# Altium footprint library Footprint.PcbLib: 411 footprints (part 12 of 26)
Each footprint in its own frame and in the unit in brackets; x right, y up, seen from the top. Pads: shape width x height; smd on the part's side, far side on the other; paste and mask are expansions set on the pad; w line width, h text height; cw(c..) or ccw(c..) is an arc to the next point about the centre after c.
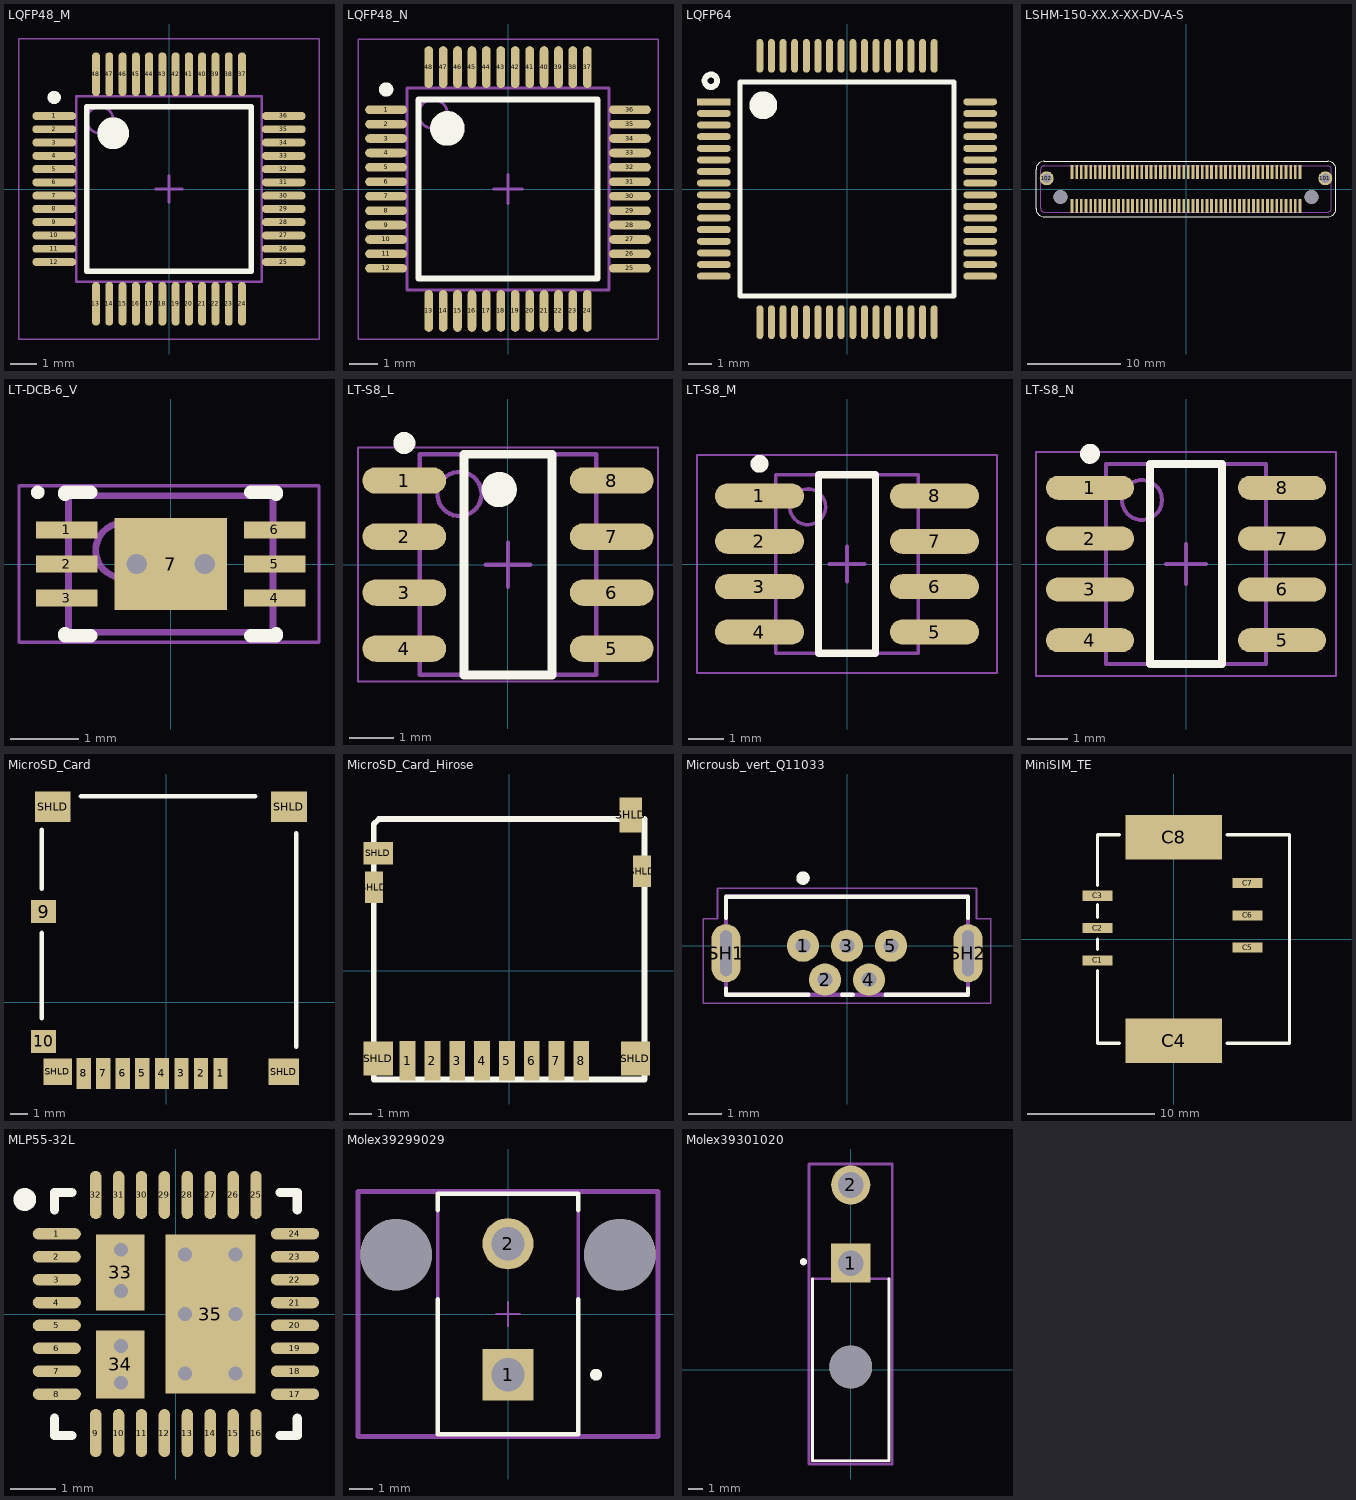
[diagram p11: the footprints below, top view; thin cyan lines are the x and y axes]

## LQFP48_M [mm] "QFP, 48-Leads, Body 7x7mm, Pitch 0.5mm, IPC Low Density"
height 1.6
pads (48):
  oval 1.65x0.3 smd: 1(-4.325,2.75) 2(-4.325,2.25) 3(-4.325,1.75) 4(-4.325,1.25) 5(-4.325,0.75) 6(-4.325,0.25) 7(-4.325,-0.25) 8(-4.325,-0.75) 9(-4.325,-1.25) 10(-4.325,-1.75) 11(-4.325,-2.25) 12(-4.325,-2.75) 25(4.325,-2.75) 26(4.325,-2.25) 27(4.325,-1.75) 28(4.325,-1.25) 29(4.325,-0.75) 30(4.325,-0.25) 31(4.325,0.25) 32(4.325,0.75) 33(4.325,1.25) 34(4.325,1.75) 35(4.325,2.25) 36(4.325,2.75)
  oval 0.3x1.65 smd: 13(-2.75,-4.325) 14(-2.25,-4.325) 15(-1.75,-4.325) 16(-1.25,-4.325) 17(-0.75,-4.325) 18(-0.25,-4.325) 19(0.25,-4.325) 20(0.75,-4.325) 21(1.25,-4.325) 22(1.75,-4.325) 23(2.25,-4.325) 24(2.75,-4.325) 37(2.75,4.325) 38(2.25,4.325) 39(1.75,4.325) 40(1.25,4.325) 41(0.75,4.325) 42(0.25,4.325) 43(-0.25,4.325) 44(-0.75,4.325) 45(-1.25,4.325) 46(-1.75,4.325) 47(-2.25,4.325) 48(-2.75,4.325)
Top Overlay:
  circle w0.6: c-2.1,2.1 r0.3
  circle w0.25: c-4.325,3.45 r0.125
  lines w0.2: -3.1,-3.1 3.1,-3.1 3.1,3.1 -3.1,3.1 -3.1,-3.1
Mechanical 13:
  circle w0.1: c-2.6,2.6 r0.5
  lines w0.1: -3.5,-3.5 3.5,-3.5 3.5,3.5 -3.5,3.5 -3.5,-3.5
Mechanical 15:
  lines w0.05: -5.65,-5.65 5.65,-5.65 5.65,5.65 -5.65,5.65 -5.65,-5.65
  lines w0.1: -0.5,0 0.5,0 ; 0,-0.5 0,0.5
3D body: height 1.6, standoff 0.05, extent -3.5,-3.5 3.5,3.5

## LQFP48_N [mm] "QFP, 48-Leads, Body 7x7mm, Pitch 0.5mm, IPC Medium Density"
height 1.6
pads (48):
  oval 1.45x0.3 smd: 1(-4.225,2.75) 2(-4.225,2.25) 3(-4.225,1.75) 4(-4.225,1.25) 5(-4.225,0.75) 6(-4.225,0.25) 7(-4.225,-0.25) 8(-4.225,-0.75) 9(-4.225,-1.25) 10(-4.225,-1.75) 11(-4.225,-2.25) 12(-4.225,-2.75) 25(4.225,-2.75) 26(4.225,-2.25) 27(4.225,-1.75) 28(4.225,-1.25) 29(4.225,-0.75) 30(4.225,-0.25) 31(4.225,0.25) 32(4.225,0.75) 33(4.225,1.25) 34(4.225,1.75) 35(4.225,2.25) 36(4.225,2.75)
  oval 0.3x1.45 smd: 13(-2.75,-4.225) 14(-2.25,-4.225) 15(-1.75,-4.225) 16(-1.25,-4.225) 17(-0.75,-4.225) 18(-0.25,-4.225) 19(0.25,-4.225) 20(0.75,-4.225) 21(1.25,-4.225) 22(1.75,-4.225) 23(2.25,-4.225) 24(2.75,-4.225) 37(2.75,4.225) 38(2.25,4.225) 39(1.75,4.225) 40(1.25,4.225) 41(0.75,4.225) 42(0.25,4.225) 43(-0.25,4.225) 44(-0.75,4.225) 45(-1.25,4.225) 46(-1.75,4.225) 47(-2.25,4.225) 48(-2.75,4.225)
Top Overlay:
  circle w0.25: c-4.225,3.45 r0.125
  circle w0.6: c-2.1,2.1 r0.3
  lines w0.2: -3.1,-3.1 -3.1,3.1 3.1,3.1 3.1,-3.1 -3.1,-3.1
Mechanical 13:
  circle w0.1: c-2.6,2.6 r0.5
  lines w0.1: -3.5,-3.5 -3.5,3.5 3.5,3.5 3.5,-3.5 -3.5,-3.5
Mechanical 15:
  lines w0.05: -5.2,-5.2 -5.2,5.2 5.2,5.2 5.2,-5.2 -5.2,-5.2
  lines w0.1: -0.5,0 0.5,0 ; 0,-0.5 0,0.5
3D body: height 1.6, standoff 0.05, extent -3.5,-3.5 3.5,3.5

## LQFP64 [mm]
height 1.6
pads (64):
  rect 1.45x0.3 smd: 1(-5.725,3.75)
  oval 1.45x0.3 smd: 2(-5.725,3.25) 3(-5.725,2.75) 4(-5.725,2.25) 5(-5.725,1.75) 6(-5.725,1.25) 7(-5.725,0.75) 8(-5.725,0.25) 9(-5.725,-0.25) 10(-5.725,-0.75) 11(-5.725,-1.25) 12(-5.725,-1.75) 13(-5.725,-2.25) 14(-5.725,-2.75) 15(-5.725,-3.25) 16(-5.725,-3.75) 33(5.725,-3.75) 34(5.725,-3.25) 35(5.725,-2.75) 36(5.725,-2.25) 37(5.725,-1.75) 38(5.725,-1.25) 39(5.725,-0.75) 40(5.725,-0.25) 41(5.725,0.25) 42(5.725,0.75) 43(5.725,1.25) 44(5.725,1.75) 45(5.725,2.25) 46(5.725,2.75) 47(5.725,3.25) 48(5.725,3.75)
  oval 0.3x1.45 smd: 17(-3.75,-5.725) 18(-3.25,-5.725) 19(-2.75,-5.725) 20(-2.25,-5.725) 21(-1.75,-5.725) 22(-1.25,-5.725) 23(-0.75,-5.725) 24(-0.25,-5.725) 25(0.25,-5.725) 26(0.75,-5.725) 27(1.25,-5.725) 28(1.75,-5.725) 29(2.25,-5.725) 30(2.75,-5.725) 31(3.25,-5.725) 32(3.75,-5.725) 49(3.75,5.725) 50(3.25,5.725) 51(2.75,5.725) 52(2.25,5.725) 53(1.75,5.725) 54(1.25,5.725) 55(0.75,5.725) 56(0.25,5.725) 57(-0.25,5.725) 58(-0.75,5.725) 59(-1.25,5.725) 60(-1.75,5.725) 61(-2.25,5.725) 62(-2.75,5.725) 63(-3.25,5.725) 64(-3.75,5.725)
Top Overlay:
  circle w0.25: c-5.854,4.654 r0.269
  circle w0.6: c-3.6,3.6 r0.3
  lines w0.2: -4.6,-4.6 -4.6,4.6 4.6,4.6 4.6,-4.6 -4.6,-4.6
3D body "User Library-LQFP-64-1.step": height 1.5, standoff 0, extent -6,-6 6,6

## LSHM-150-XX.X-XX-DV-A-S [mm]
pads (104):
  rect 0.3x1.5 smd: 1(12.25,-1.85) 2(12.25,1.85) 3(11.75,-1.85) 4(11.75,1.85) 5(11.25,-1.85) 6(11.25,1.85) 7(10.75,-1.85) 8(10.75,1.85) 9(10.25,-1.85) 10(10.25,1.85) 11(9.75,-1.85) 12(9.75,1.85) 13(9.25,-1.85) 14(9.25,1.85) 15(8.75,-1.85) 16(8.75,1.85) 17(8.25,-1.85) 18(8.25,1.85) 19(7.75,-1.85) 20(7.75,1.85) 21(7.25,-1.85) 22(7.25,1.85) 23(6.75,-1.85) 24(6.75,1.85) 25(6.25,-1.85) 26(6.25,1.85) 27(5.75,-1.85) 28(5.75,1.85) 29(5.25,-1.85) 30(5.25,1.85) 31(4.75,-1.85) 32(4.75,1.85) 33(4.25,-1.85) 34(4.25,1.85) 35(3.75,-1.85) 36(3.75,1.85) 37(3.25,-1.85) 38(3.25,1.85) 39(2.75,-1.85) 40(2.75,1.85) 41(2.25,-1.85) 42(2.25,1.85) 43(1.75,-1.85) 44(1.75,1.85) 45(1.25,-1.85) 46(1.25,1.85) 47(0.75,-1.85) 48(0.75,1.85) 49(0.25,-1.85) 50(0.25,1.85) 51(-0.25,-1.85) 52(-0.25,1.85) 53(-0.75,-1.85) 54(-0.75,1.85) 55(-1.25,-1.85) 56(-1.25,1.85) 57(-1.75,-1.85) 58(-1.75,1.85) 59(-2.25,-1.85) 60(-2.25,1.85) 61(-2.75,-1.85) 62(-2.75,1.85) 63(-3.25,-1.85) 64(-3.25,1.85) 65(-3.75,-1.85) 66(-3.75,1.85) 67(-4.25,-1.85) 68(-4.25,1.85) 69(-4.75,-1.85) 70(-4.75,1.85) 71(-5.25,-1.85) 72(-5.25,1.85) 73(-5.75,-1.85) 74(-5.75,1.85) 75(-6.25,-1.85) 76(-6.25,1.85) 77(-6.75,-1.85) 78(-6.75,1.85) 79(-7.25,-1.85) 80(-7.25,1.85) 81(-7.75,-1.85) 82(-7.75,1.85) 83(-8.25,-1.85) 84(-8.25,1.85) 85(-8.75,-1.85) 86(-8.75,1.85) 87(-9.25,-1.85) 88(-9.25,1.85) 89(-9.75,-1.85) 90(-9.75,1.85) 91(-10.25,-1.85) 92(-10.25,1.85) 93(-10.75,-1.85) 94(-10.75,1.85) 95(-11.25,-1.85) 96(-11.25,1.85) 97(-11.75,-1.85) 98(-11.75,1.85) 99(-12.25,-1.85) 100(-12.25,1.85)
  round 1.5 hole 1: 101(14.975,1.15) 102(-14.975,1.15)
  round 1.5 hole 1.5 unplated: ""(-13.5,-0.85) ""(13.5,-0.85)
Top Overlay:
  lines w0.127: -16.125,-2.1 ccw(c-15.225,-2.1) -15.225,-3 15.225,-3 ccw(c15.225,-2.1) 16.125,-2.1 16.125,2.1 ccw(c15.225,2.1) 15.225,3 -15.225,3 ccw(c-15.225,2.1) -16.125,2.1 -16.125,-2.1
Mechanical 13:
  lines w0.127: -15.625,-2.09 ccw(c-15.225,-2.09) -15.225,-2.49 15.225,-2.49 ccw(c15.225,-2.09) 15.625,-2.09 15.625,2.09 ccw(c15.225,2.09) 15.225,2.49 -15.225,2.49 ccw(c-15.225,2.09) -15.625,2.09 -15.625,-2.09
3D body "JM2.step": height 5.44, standoff -1.66, extent -15.423,-2.5 15.423,2.48

## LT-DCB-6_V [mm] "SON, 6-Leads, Body 3x2mm, Pitch 0.5mm, Thermal Pad 1.65x1.35mm"
height 0.8
pads (7):
  rect 0.9x0.25 smd mask+0.102: 1(-1.525,0.5) 2(-1.525,0) 3(-1.525,-0.5) 4(1.525,-0.5) 5(1.525,0) 6(1.525,0.5)
  rect 1.65x1.35 smd mask+0.102: 7(0,0)
via 0.5,0 diameter 0.6 hole 0.3
via -0.5,0 diameter 0.6 hole 0.3
Top Overlay:
  circle w0.1: c-1.95,1.05 r0.05
  lines w0.2: -1.55,-1.025 -1.55,-1.05 -1.175,-1.05 ; -1.55,1.025 -1.55,1.05 -1.175,1.05 ; 1.175,-1.05 1.55,-1.05 1.55,-1.025 ; 1.175,1.05 1.55,1.05 1.55,1.025
Mechanical 13:
  circle w0.1: c-0.7,0.2 r0.4
  lines w0.1: -1.5,-1 1.5,-1 1.5,1 -1.5,1 -1.5,-1
Mechanical 15:
  lines w0.05: -2.225,-1.15 2.175,-1.15 2.175,1.15 -2.225,1.15 -2.225,-1.15
  lines w0.1: -0.5,0 0.5,0 ; 0,-0.5 0,0.5
3D body: height 0.8, standoff 0, extent -1.5,-1 1.5,1

## LT-S8_L [mm] "SOP, 8-Leads, Body 4.9x3.9mm, Pitch 1.27mm, IPC High Density"
height 1.76
pads (8):
  oval 1.9x0.6 smd: 1(-2.35,1.905) 2(-2.35,0.635) 3(-2.35,-0.635) 4(-2.35,-1.905) 5(2.35,-1.905) 6(2.35,-0.635) 7(2.35,0.635) 8(2.35,1.905)
Top Overlay:
  circle w0.4: c-0.2,1.7 r0.2
  circle w0.25: c-2.35,2.755 r0.125
  lines w0.2: -1,-2.5 1,-2.5 1,2.5 -1,2.5 -1,-2.5
Mechanical 13:
  circle w0.1: c-1.1,1.6 r0.5
  lines w0.1: -2,-2.5 2,-2.5 2,2.5 -2,2.5 -2,-2.5
Mechanical 15:
  lines w0.05: -3.4,-2.65 3.4,-2.65 3.4,2.65 -3.4,2.65 -3.4,-2.65
  lines w0.1: -0.5,0 0.5,0 ; 0,-0.5 0,0.5
3D body: height 1.76, standoff 0.1, extent -2,-2.5 2,2.5

## LT-S8_M [mm] "SOP, 8-Leads, Body 4.9x3.9mm, Pitch 1.27mm, IPC Low Density"
height 1.76
pads (8):
  oval 2.5x0.7 smd: 1(-2.45,1.905) 2(-2.45,0.635) 3(-2.45,-0.635) 4(-2.45,-1.905) 5(2.45,-1.905) 6(2.45,-0.635) 7(2.45,0.635) 8(2.45,1.905)
Top Overlay:
  circle w0.25: c-2.45,2.805 r0.125
  lines w0.2: -0.8,-2.5 0.8,-2.5 0.8,2.5 -0.8,2.5 -0.8,-2.5
Mechanical 13:
  circle w0.1: c-1.1,1.6 r0.5
  lines w0.1: -2,-2.5 2,-2.5 2,2.5 -2,2.5 -2,-2.5
Mechanical 15:
  lines w0.05: -4.2,-3.05 4.2,-3.05 4.2,3.05 -4.2,3.05 -4.2,-3.05
  lines w0.1: -0.5,0 0.5,0 ; 0,-0.5 0,0.5
3D body: height 1.76, standoff 0.1, extent -2,-2.5 2,2.5

## LT-S8_N [mm] "SOP, 8-Leads, Body 4.9x3.9mm, Pitch 1.27mm, IPC Medium Density"
height 1.76
pads (8):
  oval 2.2x0.6 smd: 1(-2.4,1.905) 2(-2.4,0.635) 3(-2.4,-0.635) 4(-2.4,-1.905) 5(2.4,-1.905) 6(2.4,-0.635) 7(2.4,0.635) 8(2.4,1.905)
Top Overlay:
  circle w0.25: c-2.4,2.755 r0.125
  lines w0.2: -0.9,-2.5 0.9,-2.5 0.9,2.5 -0.9,2.5 -0.9,-2.5
Mechanical 13:
  circle w0.1: c-1.1,1.6 r0.5
  lines w0.1: -2,-2.5 2,-2.5 2,2.5 -2,2.5 -2,-2.5
Mechanical 15:
  lines w0.05: -3.75,-2.8 3.75,-2.8 3.75,2.8 -3.75,2.8 -3.75,-2.8
  lines w0.1: -0.5,0 0.5,0 ; 0,-0.5 0,0.5
3D body: height 1.76, standoff 0.1, extent -2,-2.5 2,2.5

## M3_Mounting_Hole [mm]
via 0,0 diameter 7 hole 3.2

## MicroSD_Card [mm]
pads (14):
  rect 0.8x1.75 smd: 1(3.05,-4) 2(1.95,-4) 3(0.85,-4) 4(-0.25,-4) 5(-1.35,-4) 6(-2.45,-4) 7(-3.55,-4) 8(-4.65,-4)
  rect 1.4x1.29 smd: 9(-6.9,5.1) 10(-6.9,-2.2)
  rect 2x1.7 smd: SHLD(-6.4,11) SHLD(6.9,11)
  rect 1.6x1.5 smd: SHLD(-6.1,-3.9)
  rect 1.7x1.5 smd: SHLD(6.6,-3.9)
Top Overlay:
  lines w0.254: -7,-0.9 -7,3.9 ; -7,6.4 -7,9.7 ; -4.8,11.6 5,11.6 ; 7.3,-2.5 7.3,9.5
3D body "5027740891.stp": height 1.78, standoff -0.02, extent -7.005,-4.415 7.295,11.585

## MicroSD_Card_Hirose [mm]
pads (14):
  rect 0.7x1.75 smd: 1(-4.5,-4) 2(-3.4,-4) 3(-2.3,-4) 4(-1.2,-4) 5(-0.1,-4) 6(1,-4) 7(2.1,-4) 8(3.2,-4)
  rect 0.8x1.4 smd: SHLD(-6,3.7) SHLD(5.9,4.4)
  rect 1.3x1.5 smd: SHLD(-5.8,-3.9) SHLD(5.6,-3.9)
  rect 1.3x1 smd: SHLD(-5.8,5.2)
  rect 1x1.55 smd: SHLD(5.4,6.9)
Top Overlay:
  lines w0.254: 5.9,6.725 -5.775,6.725 -6,6.5 -6,-4.826 6,-4.826 6,6.725

## Microusb_vert_Q11033 [mm]
pads (7):
  round 0.948 hole 0.44: 1(-1.3,0) 2(-0.65,-1) 3(0,0) 4(0.65,-1) 5(1.3,0)
  oval 0.858x1.716 hole 0.35 slot 1.35 at 90 deg: SH1(-3.575,-0.22) SH2(3.575,-0.22)
Top Overlay:
  circle w0.2: c-1.3,2 r0.1
  lines w0.127: -3.575,-1.26 -3.575,-1.45 -1.14,-1.45 ; -3.575,0.82 -3.575,1.45 3.575,1.45 3.575,0.82 ; -0.15,-1.45 0.17,-1.45 ; 1.14,-1.45 3.575,-1.45 3.575,-1.26
Mechanical 13:
  circle w0.2: c-1.3,0 r0.1
  lines w0.127: -3.575,-1.45 -3.575,1.45 3.575,1.45 3.575,-1.45 -3.575,-1.45
Mechanical 15:
  lines w0.05: -4.25,-1.7 4.25,-1.7 4.25,0.8 3.825,0.8 3.825,1.7 -3.825,1.7 -3.825,0.8 -4.25,0.8 -4.25,-1.7
3D body "614105150721.stp": height 5.66, standoff -1.49, extent -3.937,-1.577 4.063,1.323

## MiniSIM_TE [mm]
pads (8):
  rect 2.38x0.8 smd: C1(-6,-1.68) C2(-6,0.86) C3(-6,3.4) C5(5.8,-0.68) C6(5.8,1.86) C7(5.8,4.4)
  rect 7.6x3.5 smd: С4(0,-8) С8(0,8)
Top Overlay:
  lines w0.254: -6,-2.5 -6,-8.2 -4.3,-8.2 ; -6,-0.8 -6,0 ; -6,1.7 -6,2.7 ; -6,4.2 -6,8.2 -4.3,8.2 ; 4.2,-8.2 9.1,-8.2 9.1,8.2 4.2,8.2
3D body "c-1932768-1-a-3d.stp": height 2.02, standoff 0.01, extent -5.95,-8.15 9.1,8.15

## MLP55-32L [mm] "QFN, 32-Leads, Body 5,00x5,00mm, Pitch 0,50mm, Thermal Pad 3,48x3,48mm, IPC Medium Density"
height 0.85
pads (35):
  oval 1.05x0.25 smd: 1(-2.6,1.75) 2(-2.6,1.25) 3(-2.6,0.75) 4(-2.6,0.25) 5(-2.6,-0.25) 6(-2.6,-0.75) 7(-2.6,-1.25) 8(-2.6,-1.75) 17(2.6,-1.75) 18(2.6,-1.25) 19(2.6,-0.75) 20(2.6,-0.25) 21(2.6,0.25) 22(2.6,0.75) 23(2.6,1.25) 24(2.6,1.75)
  oval 0.25x1.05 smd: 9(-1.75,-2.6) 10(-1.25,-2.6) 11(-0.75,-2.6) 12(-0.25,-2.6) 13(0.25,-2.6) 14(0.75,-2.6) 15(1.25,-2.6) 16(1.75,-2.6) 25(1.75,2.6) 26(1.25,2.6) 27(0.75,2.6) 28(0.25,2.6) 29(-0.25,2.6) 30(-0.75,2.6) 31(-1.25,2.6) 32(-1.75,2.6)
  rect 1.05x1.66 smd: 33(-1.215,0.91)
  rect 1.05x1.48 smd: 34(-1.215,-1.1)
  rect 1.97x3.48 smd: 35(0.755,0)
via 0.2,1.3 diameter 0.7 hole 0.3
via 0.2,0 diameter 0.7 hole 0.3
via 0.2,-1.3 diameter 0.7 hole 0.3
via 1.3,0 diameter 0.7 hole 0.3
via 1.3,1.3 diameter 0.7 hole 0.3
via 1.3,-1.3 diameter 0.7 hole 0.3
via -1.2,1.4 diameter 0.6 hole 0.3
via -1.2,0.5 diameter 0.6 hole 0.3
via -1.2,-0.7 diameter 0.6 hole 0.3
via -1.2,-1.5 diameter 0.6 hole 0.3
Top Overlay:
  circle w0.25: c-3.3,2.5 r0.125
  lines w0.2: -2.65,-2.275 -2.65,-2.65 -2.275,-2.65 ; -2.65,2.275 -2.65,2.65 -2.275,2.65 ; 2.275,-2.65 2.65,-2.65 2.65,-2.275 ; 2.275,2.65 2.65,2.65 2.65,2.275
3D body "User Library-SiC402.STEP": height 0.9, standoff 0, extent -2.502,-2.499 2.498,2.501

## Molex39299029 [mm]
pads (4):
  rect 2.15x2.15 hole 1.4 paste-1000 mask+0: 1(0,-2.55)
  round 2.15 hole 1.4 paste-1000 mask+0: 2(0,2.95)
  round 3 hole 3 unplated paste-1000 mask+0: ""(-4.7,2.49) ""(4.7,2.49)
Top Overlay:
  circle w0.25: c3.7,-2.55 r0.125
  lines w0.2: -2.95,0.615 -2.95,-5.05 2.95,-5.05 2.95,0.615 ; -2.95,4.365 -2.95,5.05 2.95,5.05 2.95,4.365
Top Component Center:
  lines w0.2: -6.3,-5.15 -6.3,5.15 6.3,5.15 6.3,-5.15 -6.3,-5.15
  text ".Designator" at 0,0 h1
Mechanical 12:
  lines w0.15: -2.95,-5.05 -2.95,5.05 2.95,5.05 2.95,-5.05 -2.95,-5.05
Mechanical 15:
  lines w0.1: -0.5,0 0.5,0 ; 0,-0.5 0,0.5
  lines w0.2: -6.3,-5.15 -6.3,5.15 6.3,5.15 6.3,-5.15 -6.3,-5.15
3D body "Conn_Molex_39-29-9029_eec.STEP": height 0.25, standoff 0, extent -6.3,-5.15 6.3,5.15

## Molex39301020 [mm]
pads (3):
  rect 2.75x2.75 hole 1.8 paste-1000 mask+0: 1(0,7.5)
  round 2.75 hole 1.8 paste-1000 mask+0: 2(0,13)
  round 3 hole 3 unplated paste-1000 mask+0: ""(0,0.2)
Top Overlay:
  circle w0.25: c-3.325,7.6 r0.125
  lines w0.2: -2.7,6.4 -2.7,-6.4 2.7,-6.4 2.7,6.4
Top Component Center:
  lines w0.2: -2.925,-6.625 -2.925,14.475 2.925,14.475 2.925,-6.625 -2.925,-6.625
  text ".Designator" at 0,3.925 h1
Mechanical 12:
  lines w0.15: -2.7,-6.4 -2.7,6.4 2.7,6.4 2.7,-6.4 -2.7,-6.4
Mechanical 15:
  lines w0.1: -0.5,0 0.5,0 ; 0,-0.5 0,0.5
  lines w0.2: -2.925,-6.625 -2.925,14.475 2.925,14.475 2.925,-6.625 -2.925,-6.625
3D body "3dmodel.step": height 0.25, standoff 0, extent -2.925,-6.625 2.925,14.475